# Altium integrated library PCB_Project.IntLib: 146 symbols (part 1 of 2)
Pins are listed as number, name and electrical type; pins without a type are passive.

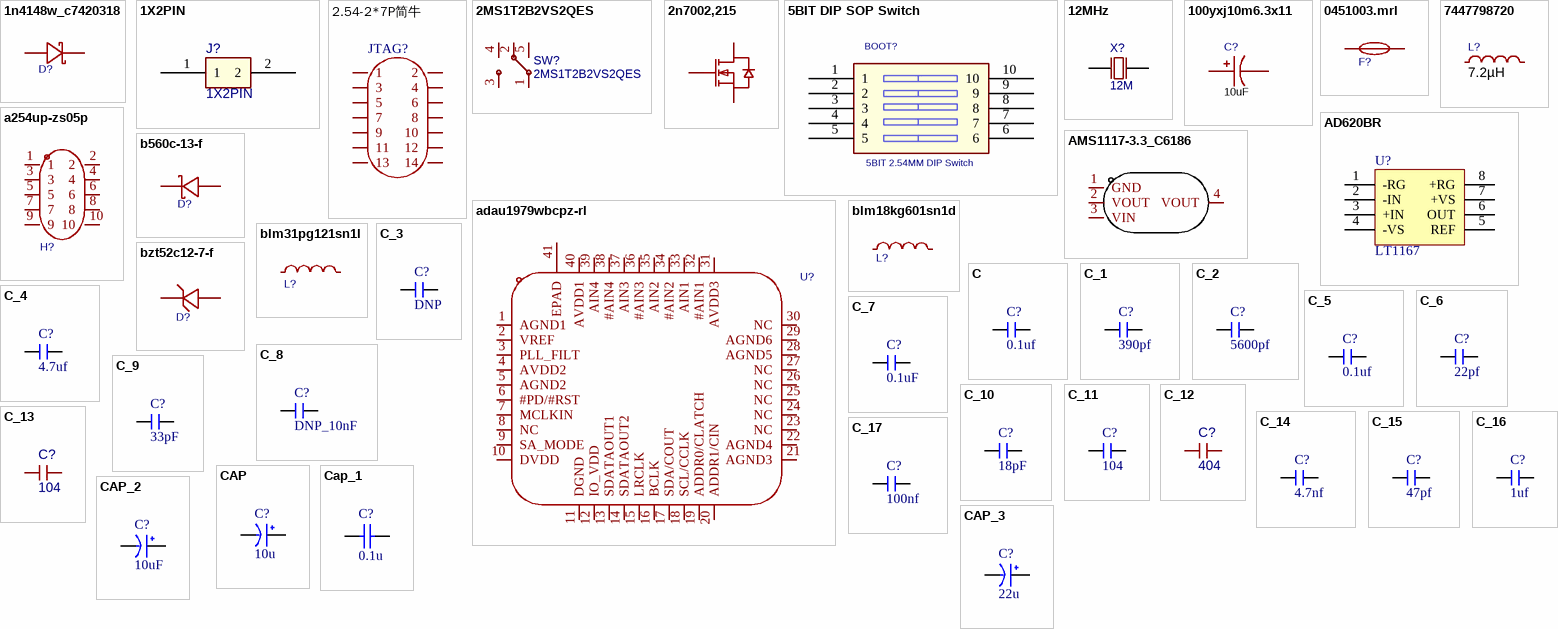
[diagram p0: symbols 1n4148w_c7420318 to CAP_3]

## 1n4148w_c7420318
designator D?  (value not drawn)
二极管配置:独立式;整流电流:150mA;直流反向耐压(Vr):100V;正向压降(Vf):1.25V@150mA;反向恢复时间(Trr):4ns;; Manufacturer: R+O(宏嘉诚); AddInBom: yes; ModelId: 5054d9b7be8b429dad093a54b517b4dd; ModelName: SOD-123_L2.7-W1.6-LS3.7-FD; ModelTransform: 145.669,61.024,0,0,0,0,0,0,0; Diode Configuration: 独立式; Pd - Power Dissipation: 400mW; Current - Rectified: 150mA; Voltage - DC Reverse(Vr): 100V; Non-Repetitive Peak Forward Surge Current: 2A; Reverse Leakage Current (Ir): 1uA@75V; Reverse Recovery Time (trr): 4ns; Operating Junction Temperature Range: -55℃~+150℃; Symbol: 1N4148W_C7420318; LCSC Part Name: 100V 150mA; SupplierPart: C7420318; ManufacturerPart: 1N4148W; Supplier Footprint: SOD-123; JLCPCB Part Class: Extended Part; Datasheet: https://item.szlcsc.com/datasheet/1N4148W/8397140.html; Supplier: LCSC; ConvertToPcb: yes; FootprintName: SOD-123_L2.7-W1.6-LS3.7-FD; Voltage - Forward(Vf@If): 1.25V@150mA
footprint SOD-123_L2.7-W1.6-LS3.7-FD
pins: 1 A, 2 K

## 1X2PIN
designator J?
footprint HDR2.54-Y-LI-2P (圆孔排母，2脚)
pins: 1, 2

## 2.54-2*7P简牛
designator JTAG?
Manufacturer: BOOMELE(博穆精密); Symbol: HDR-IDC-2.54-2X7P; Device: 2.54-2*7P简牛; Add into BOM: yes; Connector Type: 简牛座; Pitch: 2.54mm; Structure: 2x7P; Holder Type: 直插; Pin Number in each Row: 7; LCSC Part Name: 2.54mm 2x7P 排数:2 每排P数:7; Supplier Part: C11215; Manufacturer Part: 2.54-2*7P简牛; Supplier Footprint: 插件,P=2.54mm; JLCPCB Part Class: 扩展库; Datasheet: https://atta.szlcsc.com/upload/public/pdf/source/20131122/1457706661483.pdf; Supplier: LCSC; Convert to PCB: yes; Row Spacing: 2.54mm; Number of Rows: 2; Contact Material: 黄铜; Contact Plating: 金
footprint IDC-TH_14P-P2.54-V-R2-C7-S2.54
3D model IDC-TH_14P-P2.54-V-R2-C7-S2.54
pins: 1, 2, 3, 4, 5, 6, 7, 8, 9, 10, 11, 12, 13, 14

## 2MS1T2B2VS2QES
designator SW?
BOM_Manufacturer: Dailywell; Contributor: LCSC; BOM_Supplier: LCSC; BOM_Supplier Part: C545202; BOM_Manufacturer Part: 2MS1T2B2VS2QES; BOM_JLCPCB Part Class: Extended Part; spicePre: S; spiceSymbolName: 2MS1T2B2VS2QES
footprint SW-TH_2MS1T2B2VS2QES
pins: 1, 2, 3, 4, 5

## 2n7002,215
designator Q?  (value not drawn)
数量:1个N沟道;漏源电压(Vdss):60V;连续漏极电流(Id):300mA;导通电阻(RDS(on)):5Ω@10V;耗散功率(Pd):830mW;阈值电压(Vgs(th)):2.5V;; Manufacturer: Nexperia(安世); AddInBom: yes; ModelId: c62791f0466c4ae2a892c056b845b0ca; ModelName: SOT-23-3P_L2.9-W1.3-H1.0-LS2.4-P0.95; ModelTransform: 98.64468,114.173,0,180,0,0,0.001,-0.002,0; Number: 1个N沟道; Drain to Source Voltage: 60V; Current - Continuous Drain(Id): 300mA; RDS(on): 5Ω@10V; Pd - Power Dissipation: 830mW; Gate Threshold Voltage (Vgs(th)): 2.5V; Input Capacitance(Ciss): 50pF; Reverse Transfer Capacitance (Crss@Vds): 3.5pF; Type: N沟道; Output Capacitance(Coss): 6.8pF; Vgs: ±30V; Symbol: 2N7002,215; LCSC Part Name: 1个N沟道 耐压:60V 电流:300mA; SupplierPart: C65189; ManufacturerPart: 2N7002,215; Supplier Footprint: SOT-23; JLCPCB Part Class: Extended Part; Datasheet: https://item.szlcsc.com/datasheet/2N7002%252C215/66260.html; Supplier: LCSC; ConvertToPcb: yes; FootprintName: SOT-23_L2.9-W1.3-P1.90-LS2.4-BR; Gate Charge(Qg): -; Operating Temperature: -65℃~+150℃; Configuration: -
footprint SOT-23_L2.9-W1.3-P1.90-LS2.4-BR
pins: 1 G, 2 S, 3 D

## 5BIT DIP SOP Switch
designator BOOT?, comment 5BIT 2.54MM DIP Switch
Manufacturer: KE; Manufacturer PartNumber: DSWB05LHGET; Remark: 5位直插拨码开关 红色,2.54mm
footprint CON_5PIN_DIP_2D54
pins: 1, 2, 3, 4, 5, 6, 7, 8, 9, 10

## 12MHz
designator X?, comment 12M
BOM_Manufacturer: Yangxing Tech; BOM_Manufacturer Part: X49SM12MSB2SC; nameAlias: Frequency; Contributor: LCSC; BOM_Supplier: LCSC; BOM_Supplier Part: C110563; BOM_JLCPCB Part Class: Extended Part; spicePre: X; spiceSymbolName: X49SM12MSB2SC
footprint HC-49S_L11.4-W4.8 - duplicate
footprint HC-49S_L11.4-W4.8 - duplicate
pins: 1 OSC1, 2 OSC2

## 100yxj10m6.3x11
designator C?, comment 10uF
容值:10uF;精度:±20%;额定电压:100V;纹波电流:112.14mA@120Hz;等效串联电阻(ESR):570mΩ;; Manufacturer: Rubycon(红宝石); Symbol: 100YXJ10M6.3X11; AddInBom: yes; ModelId: 3cdd55eab6a840dba93006d5a727d063; ModelName: CAP-TH_BD6.3-P2.50-D0.6-FD; ModelTransform: 247.778,247.90446,0,0,0,0,0,0,-137.795; Tolerance: ±20%; Voltage Rating: 100V; Equivalent Series Resistance(ESR): 570mΩ; Pin Spacing: 2.5mm; Lifetime: 7000hrs@105℃; LCSC Part Name: 10uF ±20% 100V; SupplierPart: C1668981; ManufacturerPart: 100YXJ10M6.3X11; Supplier Footprint: 插件,D6.3xL11mm; JLCPCB Part Class: Extended Part; Supplier: LCSC; ConvertToPcb: yes; FootprintName: CAP-TH_BD6.3-P2.50-D0.6-FD; Value: 10uF; Ripple Current: 112.14mA@120Hz; Diameter: 6.3mm; Height - Seated (Max): 11mm; Operating Temperature: -40℃~+105℃
footprint CAP-TH_BD6.3-P2.50-D0.6-FD
pins: 1, 2

## 0451003.mrl
designator F?  (value not drawn)
类型:贴片式保险丝;额定电流:3A;额定电压:125V;分断能力:50A;; Manufacturer: Littelfuse(美国力特); AddInBom: yes; ModelId: ab98867368e34e88a7540bafa62641fb; ModelName: FUSE-SMD_L6.1-W2.7-H2.7; ModelTransform: 240.157,106.299,0,0,0,0,-0.0005,0.0005,0; Type: 贴片式保险丝; Current Rating: 3A; Voltage Rating (DC): 125V; Melting I2t: 0.459; Interrupt Rating: 50A; Symbol: 0451003.MRL; LCSC Part Name: 125V贴片式保险丝; SupplierPart: C13982; ManufacturerPart: 0451003.MRL; Supplier Footprint: 2410; JLCPCB Part Class: Extended Part; Datasheet: https://item.szlcsc.com/datasheet/0451003.MRL/14638.html; Supplier: LCSC; ConvertToPcb: yes; FootprintName: FUSE-SMD_L6.1-W2.7; Operating Temperature: -55℃~+125℃; Diameter (φD): -; Length: 6.1mm; Width: 2.5mm; Height: -; Pitch: -
footprint FUSE-SMD_L6.1-W2.7
pins: 1, 2

## 7447798720
designator L?, comment 7.2µH
电感值:7.2uH;精度:±30%;额定电流:7.9A;饱和电流(Isat):6A;类型:-;; Manufacturer: Wurth(伍尔特); Symbol: 7447798720; AddInBom: yes; ModelId: 669184afeb3a41a69bd447d1aa3c6b52; ModelName: IND-SMD_L10.2-W10.2_7447798720; ModelTransform: 401.574,402.3614,0,270,0,0,0,0,0; Value: 7.2uH; Tolerance: ±30%; Current Rating: 7.9A; Current - Saturation(Isat): 6A; DC Resistance(DCR): 12.8mΩ; LCSC Part Name: 7.2uH ±30% 6A; SupplierPart: C105681; ManufacturerPart: 7447798720; Supplier Footprint: SMD,10.2x10.2mm; JLCPCB Part Class: Extended Part; Datasheet: https://www.we-online.com/components/products/datasheet/7447798720.pdf; Supplier: LCSC; ConvertToPcb: yes; FootprintName: IND-SMD_L10.2-W10.2_7447798720; Type: -; Ratings: -
footprint IND-SMD_L10.2-W10.2_7447798720
pins: 1, 2

## a254up-zs05p
designator H?  (value not drawn)
插针结构:2x5P;间距:2.54mm;行距:2.54mm;圆针/方针:方针;安装方式:直插;排数:双排;总PIN位数:10P;额定电流:3A;配合针长度:6mm;塑高:2.5mm;触头材质:铜合金;触头镀层:金;工作温度:-40℃~+105℃;颜色:黑色;; Manufacturer: BXCONN(宝讯); AddInBom: yes; ModelId: c4cfba895466416fb2f10be924625d31; ModelName: HDR-TH_10P-P2.54-V-M-R2-C5-S2.54; ModelTransform: 500.00294,196.85,0,0,0,0,0,0,-118.11; Pin Structure: 2x5P; Pitch: 2.54mm; Circluar Pins/Square Pins: 方针; Current Rating: 3A; Symbol: A254UP-ZS05P; LCSC Part Name: 2x5P 间距:2.54mm 方针 直插; SupplierPart: C41413842; ManufacturerPart: A254UP-ZS05P; Supplier Footprint: 插件,P=2.54mm; JLCPCB Part Class: Extended Part; Datasheet: https://item.szlcsc.com/datasheet/A254UP-ZS05P/43230049.html; Supplier: LCSC; ConvertToPcb: yes; FootprintName: HDR-TH_10P-P2.54-V-M-R2-C5-S2.54; Row Spacing: 2.54mm; Mounting Type: 直插; Number of Rows: 双排; Number of Pins: 10P; Length of Mating Pin: 6mm; Insulation Height: 2.5mm; Contact Material: 铜合金; Contact Plating: 金; Operating Temperature: -40℃~+105℃; Color: 黑色
footprint HDR-TH_10P-P2.54-V-M-R2-C5-S2.54
pins: 1, 2, 3, 4, 5, 6, 7, 8, 9, 10

## AD620BR
designator U?, comment LT1167
CI-AD620BR
footprint SO-8 (封装库来自淘宝卖家 ID：黄晶宝石)
pins: 1 -RG, 2 -IN, 3 +IN, 4 -VS, 5 REF, 6 OUT, 7 +VS, 8 +RG

## adau1979wbcpz-rl
designator U?  (value not drawn)
分辨率:24;工作电压:3.3V~3.6V;接口类型:I2C；SPI;; Manufacturer: ADI(亚德诺); AddInBom: yes; ModelId: 7c9bc19ca4c64354924a13059f0c15c7; ModelName: QFN-40_L6.0-W6.0-P0.50-TL-EP4.1; ModelTransform: 237.007,237.007,0,0,0,0,0,0,0; Resolution: 24; Number of Channels: 4; Symbol: ADAU1979WBCPZ-RL; LCSC Part Name: 四通道模数转换器(ADC); SupplierPart: C207957; ManufacturerPart: ADAU1979WBCPZ-RL; Supplier Footprint: LFCSP-40(6x6); JLCPCB Part Class: Extended Part; Datasheet: https://item.szlcsc.com/datasheet/ADAU1979WBCPZ-RL/209011.html; Supplier: LCSC; ConvertToPcb: yes; FootprintName: QFN-40_L6.0-W6.0-P0.50-TL-EP4.1; Voltage - Supply: 3.3V~3.6V; Interface Type: I2C；SPI; Operating Temperature: -40℃~+105℃
footprint QFN-40_L6.0-W6.0-P0.50-TL-EP4.1
pins: 1 AGND1, 2 VREF, 3 PLL_FILT, 4 AVDD2, 5 AGND2, 6 #PD/#RST, 7 MCLKIN, 8 NC, 9 SA_MODE, 10 DVDD, 11 DGND, 12 IO_VDD, 13 SDATAOUT1, 14 SDATAOUT2, 15 LRCLK, 16 BCLK, 17 SDA/COUT, 18 SCL/CCLK, 19 ADDR0/CLATCH, 20 ADDR1/CIN, 21 AGND3, 22 AGND4, 23 NC, 24 NC, 25 NC, 26 NC, 27 NC, 28 AGND5, 29 AGND6, 30 NC, 31 AVDD3, 32 #AIN1, 33 AIN1, 34 #AIN2, 35 AIN2, 36 #AIN3, 37 AIN3, 38 #AIN4, 39 AIN4, 40 AVDD1, 41 EPAD

## AMS1117-3.3_C6186
designator U?  (value not drawn)
Manufacturer: AMS; Add into BOM: yes; Output Type: 固定; Output Voltage: 3.3V; MAX Output Current: 1A; Power Supply Rejection Ratio (PSRR): 72dB@(120Hz); Dropout Voltage: 1.3V@(800mA); Output Polarity: 正极; Number of Outputs: 1; Symbol: AMS1117-3.3; Device: AMS1117-3.3_C6186; LCSC Part Name: 输出3.3V 1A; Supplier Part: C6186; Manufacturer Part: AMS1117-3.3; Supplier Footprint: SOT-223-3; JLCPCB Part Class: Basic Part; Datasheet: https://atta.szlcsc.com/upload/public/pdf/source/20180727/C6186_7A095716F0823C02F1997A905E26C086.pdf; Supplier: LCSC; Convert to PCB: yes; Maximum Input Voltage: -; standby current: -; Noise: -; Feature: -; Operating Temperature: -
footprint SOT-223-3_L6.5-W3.4-P2.30-LS7.0-BR
pins: 1 GND, 2 VOUT, 3 VIN, 4 VOUT

## b560c-13-f
designator D?  (value not drawn)
二极管配置:1个独立式;正向压降(Vf):700mV@5A;直流反向耐压(Vr):60V;整流电流:5A;; Manufacturer: DIODES(美台); AddInBom: yes; ModelId: 01527a4a3c424c5dbce25e8907f4d20c; ModelName: SMC_L7.1-W6.2-LS8.1-RD; ModelTransform: 314.96,236.22,0,0,0,0,0,0,0; Diode Configuration: 1个独立式; Voltage - DC Reverse(Vr): 60V; Current - Rectified: 5A; Reverse Leakage Current (Ir): 500uA@60V; Operating Junction Temperature Range: -55℃~+150℃; Non-Repetitive Peak Forward Surge Current: 100A; Symbol: B560C-13-F; LCSC Part Name: 电压:60V 电流:5A; SupplierPart: C85100; ManufacturerPart: B560C-13-F; Supplier Footprint: SMC(DO-214AB); JLCPCB Part Class: Extended Part; Datasheet: https://item.szlcsc.com/datasheet/B560C-13-F/86272.html; Supplier: LCSC; ConvertToPcb: yes; FootprintName: SMC_L7.1-W6.2-LS8.1-RD; Voltage - Forward(Vf@If): 700mV@5A
footprint SMC_L7.1-W6.2-LS8.1-RD
pins: 1 K, 2 A

## blm18kg601sn1d
designator L?  (value not drawn)
阻抗@频率:600Ω@100MHz;误差:±25%;直流电阻(DCR):150mΩ;; Manufacturer: muRata(村田); AddInBom: yes; ModelId: 2bc5ec593d464d6ba9807aec0b5673c2; ModelName: L0603_L1.6-W0.8-H0.5_BEAD; ModelTransform: 62.992,31.496,0,180,0,0,0.094,0.629,0; Tolerance: ±25%; DC Resistance(DCR): 150mΩ; Current Rating: 1.3A; Number of Circuits: 1; Symbol: BLM18KG601SN1D; LCSC Part Name: 单路 0603磁珠 阻抗600Ω@100MHz; SupplierPart: C85833; ManufacturerPart: BLM18KG601SN1D; Supplier Footprint: 0603; JLCPCB Part Class: Extended Part; Datasheet: https://item.szlcsc.com/datasheet/BLM18KG601SN1D/87009.html; Supplier: LCSC; ConvertToPcb: yes; FootprintName: L0603; Impedance @ Frequency: 600Ω@100MHz; Operating Temperature: -55℃~+125℃
footprint L0603
pins: 1, 2

## blm31pg121sn1l
designator L?  (value not drawn)
阻抗@频率:120Ω@100MHz;误差:±25%;直流电阻(DCR):20mΩ;; Manufacturer: muRata(村田); AddInBom: yes; ModelId: 85bdab7b3d4c4074b81d208eb5e865b3; ModelName: L1206_L3.2-W1.6-H1.1; ModelTransform: 125.984,62.835,0,0,0,0,0,0,0; Tolerance: ±25%; DC Resistance(DCR): 20mΩ; Current Rating: 3.5A; Number of Circuits: 1; Symbol: BLM31PG121SN1L; LCSC Part Name: 单路 1206磁珠 阻抗120Ω@100MHz; SupplierPart: C85841; ManufacturerPart: BLM31PG121SN1L; Supplier Footprint: 1206; JLCPCB Part Class: Extended Part; Datasheet: https://item.szlcsc.com/datasheet/BLM31PG121SN1L/87017.html; Supplier: LCSC; ConvertToPcb: yes; FootprintName: L1206; Impedance @ Frequency: 120Ω@100MHz; Operating Temperature: -55℃~+125℃
footprint L1206
pins: 1, 2

## bzt52c12-7-f
designator D?  (value not drawn)
二极管配置:1个独立式;稳压值(标称值):12V;稳压值(范围值):11.4V~12.7V;耗散功率(Pd):370mW;; Manufacturer: DIODES(美台); AddInBom: yes; ModelId: ad7e39f9e5534b3c96ffdc5532ebb493; ModelName: SOD-123_L2.7-W1.6-H1.4-LS3.7; ModelTransform: 146.026,62.992,0,180,0,0,0.0005,0,0; Diode Configuration: 1个独立式; Zener Voltage(Nom): 12V; Reverse Leakage Current (Ir): 100nA@1V; Pd - Power Dissipation: 370mW; Impedance(Zzt): 25Ω; Impedance(Zzk): 150Ω; Operating Junction Temperature Range: -65℃~+150℃; Symbol: BZT52C12-7-F; LCSC Part Name: 独立式 耐压:12V 电流:0.1uA@1.0V; SupplierPart: C124196; ManufacturerPart: BZT52C12-7-F; Supplier Footprint: SOD-123; JLCPCB Part Class: Extended Part; Datasheet: https://item.szlcsc.com/datasheet/BZT52C12-7-F/125471.html; Supplier: LCSC; ConvertToPcb: yes; FootprintName: SOD-123_L2.7-W1.6-LS3.7-RD; Zener Voltage(Range): 11.4V~12.7V; Tolerance: -
footprint SOD-123_L2.7-W1.6-LS3.7-RD
pins: 1 C, 2 A

## C
designator C?, comment 0.1uf
无极性贴片电容; 版权归属: 源创客; BOM名称: 无极性贴片电容; 学习资源: www.ooocke.com
footprint 0603C
pins: 1, 2

## C_1
designator C?, comment 390pf
无极性贴片电容; 版权归属: 源创客; BOM名称: 无极性贴片电容; 学习资源: www.ooocke.com
footprint 0603C
pins: 1, 2

## C_2
designator C?, comment 5600pf
无极性贴片电容; 版权归属: 源创客; BOM名称: 无极性贴片电容; 学习资源: www.ooocke.com
footprint 0603C
pins: 1, 2

## C_3
designator C?, comment DNP
无极性贴片电容; 版权归属: 源创客; BOM名称: 无极性贴片电容; 学习资源: www.ooocke.com
footprint 0603C
pins: 1, 2

## C_4
designator C?, comment 4.7uf
无极性贴片电容; 版权归属: 源创客; BOM名称: 无极性贴片电容; 学习资源: www.ooocke.com
footprint 0603C
pins: 1, 2

## C_5
designator C?, comment 0.1uf
无极性贴片电容; 版权归属: 源创客; BOM名称: 无极性贴片电容; 学习资源: www.ooocke.com
footprint 0603C
pins: 1, 2

## C_6
designator C?, comment 22pf
无极性贴片电容; 版权归属: 源创客; BOM名称: 无极性贴片电容; 学习资源: www.ooocke.com
footprint 0603C
pins: 1, 2

## C_7
designator C?, comment 0.1uF
贴片电容; BOM名称: 无极性贴片电容; 淘宝ID: 封装库来自淘宝 ID：黄晶宝石; 联系售后，技术支持: https://shop463601444.taobao.com; 唯一出售店铺网址: https://shop463601444.taobao.com
footprint 0603C
pins: 1, 2

## C_8
designator C?, comment DNP_10nF
无极性贴片电容; 版权归属: 源创客; BOM名称: 无极性贴片电容; 学习资源: www.ooocke.com
footprint 0603C
pins: 1, 2

## C_9
designator C?, comment 33pF
贴片电容; BOM名称: 无极性贴片电容; 淘宝ID: 封装库来自淘宝 ID：黄晶宝石; 联系售后，技术支持: https://shop463601444.taobao.com; 唯一出售店铺网址: https://shop463601444.taobao.com
footprint 0603C
pins: 1, 2

## C_10
designator C?, comment 18pF
贴片电容; BOM名称: 无极性贴片电容; 淘宝ID: 封装库来自淘宝 ID：黄晶宝石; 联系售后，技术支持: https://shop463601444.taobao.com; 唯一出售店铺网址: https://shop463601444.taobao.com
footprint 0603C
pins: 1, 2

## C_11
designator C?, comment 104
贴片电容; BOM名称: 无极性贴片电容; 淘宝ID: 封装库来自淘宝 ID：黄晶宝石; 联系售后，技术支持: https://shop463601444.taobao.com; 唯一出售店铺网址: https://shop463601444.taobao.com
footprint 0603C
pins: 1, 2

## C_12
designator C?, comment 404
贴片电容; Device: C; BOM名称: 无极性贴片电容; 淘宝ID: 封装库来自淘宝 ID：黄晶宝石; Origin Footprint: C 0201_L; OriginFootprint 2: C 0402_L; OriginFootprint 3: C 0805_L; OriginFootprint 4: C 1206_L; OriginFootprint 5: C 1210_L; OriginFootprint 6: C 1808_L; OriginFootprint 7: C 1812_L; OriginFootprint 8: C 1825_L; OriginFootprint 9: C 2225_L; OriginFootprint 10: C 0201_M; OriginFootprint 11: C 0402_M; OriginFootprint 12: C 0603_M; OriginFootprint 13: C 0805_M; OriginFootprint 14: C 1206_M; OriginFootprint 15: C 1210_M; OriginFootprint 16: C 1808_M; OriginFootprint 17: C 1812_M; OriginFootprint 18: C 1825_M; OriginFootprint 19: C 2225_M; UniqueId: 043006a40a259ae3; AddInBom: yes; OriginModelName: C 0603; 联系售后，技术支持: https://shop463601444.taobao.com; 唯一出售店铺网址: https://shop463601444.taobao.com; DesignItemID: C; LibraryName: 0.1 - 电阻-电容-电感; SymbolName: C; FootprintName: C 0603_L
footprint C 0603_L
pins: 1, 2

## C_13
designator C?, comment 104
贴片电容; Device: C; BOM名称: 无极性贴片电容; 淘宝ID: 封装库来自淘宝 ID：黄晶宝石; Origin Footprint: C 0201_L; OriginFootprint 2: C 0402_L; OriginFootprint 3: C 0805_L; OriginFootprint 4: C 1206_L; OriginFootprint 5: C 1210_L; OriginFootprint 6: C 1808_L; OriginFootprint 7: C 1812_L; OriginFootprint 8: C 1825_L; OriginFootprint 9: C 2225_L; OriginFootprint 10: C 0201_M; OriginFootprint 11: C 0402_M; OriginFootprint 12: C 0603_M; OriginFootprint 13: C 0805_M; OriginFootprint 14: C 1206_M; OriginFootprint 15: C 1210_M; OriginFootprint 16: C 1808_M; OriginFootprint 17: C 1812_M; OriginFootprint 18: C 1825_M; OriginFootprint 19: C 2225_M; UniqueId: 909660952e1a96fd; AddInBom: yes; OriginModelName: C 0603; 联系售后，技术支持: https://shop463601444.taobao.com; 唯一出售店铺网址: https://shop463601444.taobao.com; DesignItemID: C; LibraryName: 0.1 - 电阻-电容-电感; SymbolName: C; FootprintName: C 0603_L
footprint C 0603_L
pins: 1, 2

## C_14
designator C?, comment 4.7nf
无极性贴片电容; 版权归属: 源创客; BOM名称: 无极性贴片电容; 学习资源: www.ooocke.com
footprint 0603C
pins: 1, 2

## C_15
designator C?, comment 47pf
无极性贴片电容; 版权归属: 源创客; BOM名称: 无极性贴片电容; 学习资源: www.ooocke.com
footprint 0603C
pins: 1, 2

## C_16
designator C?, comment 1uf
无极性贴片电容; 版权归属: 源创客; BOM名称: 无极性贴片电容; 学习资源: www.ooocke.com
footprint 0603C
pins: 1, 2

## C_17
designator C?, comment 100nf
无极性贴片电容; 版权归属: 源创客; BOM名称: 无极性贴片电容; 学习资源: www.ooocke.com
footprint 0603C
pins: 1, 2

## CAP
designator C?, comment 10u
footprint 5x11mm
pins: 1 VCC, 2 GND

## Cap_1
designator C?, comment 0.1u
Capacitor; Value: 104; Published: 8-Jun-2000; LatestRevisionDate: 17-Jul-2002; LatestRevisionNote: Re-released for DXP Platform.; Publisher: Altium Limited
simulation model CAP (Capacitor)
signal-integrity model Cap
footprint 0603C
pins: 1, 2

## CAP_2
designator C?, comment 10uF
footprint 5x11mm
pins: 1 VCC, 2 GND

## CAP_3
designator C?, comment 22u
footprint 5x11mm
pins: 1 VCC, 2 GND

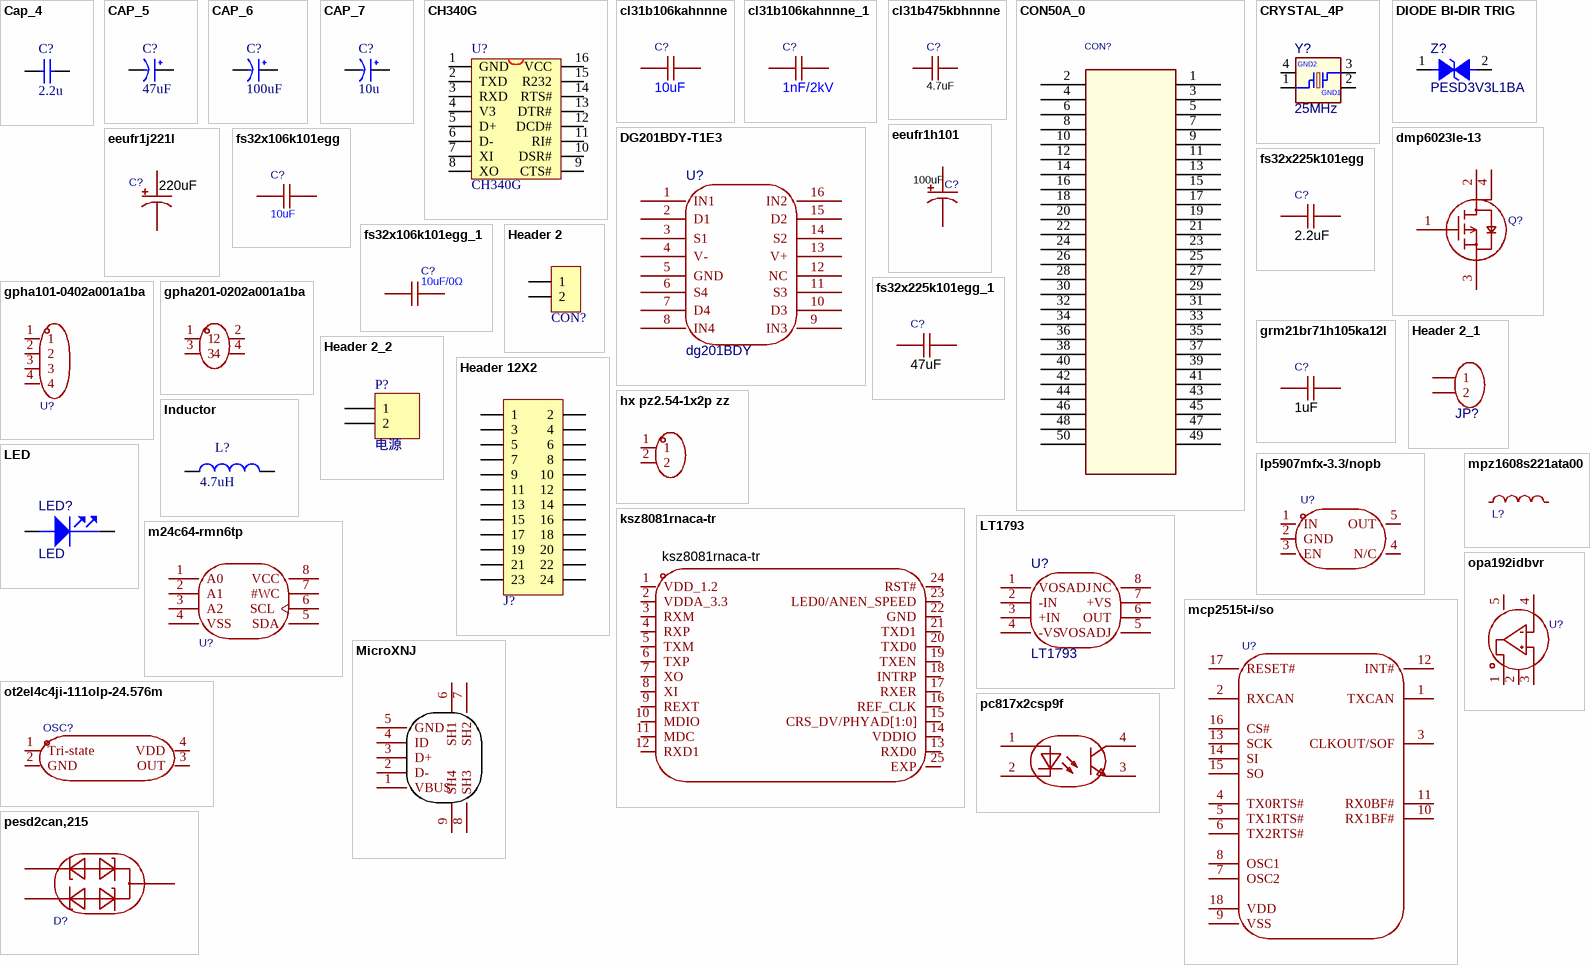
[diagram p1: symbols Cap_4 to pesd2can,215]

## Cap_4
designator C?, comment 2.2u
Capacitor; Value: 104; Published: 8-Jun-2000; LatestRevisionDate: 17-Jul-2002; LatestRevisionNote: Re-released for DXP Platform.; Publisher: Altium Limited
simulation model CAP (Capacitor)
signal-integrity model Cap
footprint 0603C
pins: 1, 2

## CAP_5
designator C?, comment 47uF
47µF/25V
footprint CAP-TH_BD8.0-P3.50-D0.6-FD
pins: 1 VCC, 2 GND

## CAP_6
designator C?, comment 100uF
100µF/63V
footprint CAP-TH_BD8.0-P3.50-D0.6-FD
pins: 1 VCC, 2 GND

## CAP_7
designator C?, comment 10u
10µF/25V
footprint 5x11mm
pins: 1 VCC, 2 GND

## CH340G
designator U?
USB2UART
footprint SOP16M (Small Outline; 16 Leads; Body Width 3.9 mm; Pitch 1.27 mm)
pins: 1 GND, 2 TXD, 3 RXD, 4 V3, 5 D+, 6 D-, 7 XI, 8 XO, 9 CTS#, 10 DSR#, 11 RI#, 12 DCD#, 13 DTR#, 14 RTS#, 15 R232, 16 VCC

## cl31b106kahnnne
designator C?, comment 10uF
容值:10uF;精度:±10%;额定电压:25V;温度系数:X7R;; Manufacturer: SAMSUNG(三星); Symbol: CL31B106KAHNNNE; AddInBom: yes; ModelId: e4be705b945545a48e666415e3682bd8; ModelName: C1206_L3.2-W1.6-H1.3; ModelTransform: 125.984,62.992,0,0,0,0,0,0,0; Tolerance: ±10%; Voltage Rating: 25V; Temperature Coefficient: X7R; LCSC Part Name: 10uF ±10% 25V; SupplierPart: C14860; ManufacturerPart: CL31B106KAHNNNE; Supplier Footprint: 1206; JLCPCB Part Class: Extended Part; Datasheet: https://item.szlcsc.com/datasheet/CL31B106KAHNNNE/15532.html; Supplier: LCSC; ConvertToPcb: yes; FootprintName: C1206; Value: 10uF
footprint C1206
pins: 1, 2

## cl31b106kahnnne_1
designator C?, comment 1nF/2kV
容值:10uF;精度:±10%;额定电压:25V;温度系数:X7R;; Manufacturer: SAMSUNG(三星); Symbol: CL31B106KAHNNNE; AddInBom: yes; ModelId: e4be705b945545a48e666415e3682bd8; ModelName: C1206_L3.2-W1.6-H1.3; ModelTransform: 125.984,62.992,0,0,0,0,0,0,0; Value: 10uF; Tolerance: ±10%; Voltage Rating: 25V; Temperature Coefficient: X7R; LCSC Part Name: 10uF ±10% 25V; SupplierPart: C14860; ManufacturerPart: CL31B106KAHNNNE; Supplier Footprint: 1206; JLCPCB Part Class: Extended Part; Datasheet: https://item.szlcsc.com/datasheet/CL31B106KAHNNNE/15532.html; Supplier: LCSC; ConvertToPcb: yes; FootprintName: C1206
footprint C1206
pins: 1, 2

## cl31b475kbhnnne
designator C?, comment 4.7uF
容值:4.7uF;精度:±10%;额定电压:50V;温度系数:X7R;; Manufacturer: SAMSUNG(三星); Symbol: CL31B475KBHNNNE; AddInBom: yes; ModelId: e4be705b945545a48e666415e3682bd8; ModelName: C1206_L3.2-W1.6-H1.3; ModelTransform: 125.984,62.992,0,0,0,0,0,0,0; Tolerance: ±10%; Voltage Rating: 50V; Temperature Coefficient: X7R; LCSC Part Name: 4.7uF ±10% 50V; SupplierPart: C51205; ManufacturerPart: CL31B475KBHNNNE; Supplier Footprint: 1206; JLCPCB Part Class: Extended Part; Datasheet: https://item.szlcsc.com/datasheet/CL31B475KBHNNNE/52218.html; Supplier: LCSC; ConvertToPcb: yes; FootprintName: C1206; Value: 4.7uF
footprint C1206
pins: 1, 2

## CON50A_0
designator CON?
Manufacturer: 连科; Manufacturer PartNumber: NLWBP05-50C-1.3H; Remark: 0.5mm 50P B2B 3.5mm合高 公头
footprint NLWBS05-50C-2.2H
pins: 1, 2, 3, 4, 5, 6, 7, 8, 9, 10, 11, 12, 13, 14, 15, 16, 17, 18, 19, 20, 21, 22, 23, 24, 25, 26, 27, 28, 29, 30, 31, 32, 33, 34, 35, 36, 37, 38, 39, 40, 41, 42, 43, 44, 45, 46, 47, 48, 49, 50

## CRYSTAL_4P
designator Y?, comment 25MHz
CLASS: IC
footprint SMD3225-4P
pins: 1, 2 GND1 (power), 3, 4 GND2 (power)

## DG201BDY-T1E3
designator U?, comment dg201BDY
Device: DG201BDY-T1E3; UniqueId: 4bb3335060f18692; AddInBom: yes; DesignItemID: DG201BDY-T1E3; LibraryName: 4.1 - 未分类器件; SymbolName: DG201BDY-T1E3; FootprintName: dg201BDY
footprint dg201BDY
pins: 1 IN1, 2 D1, 3 S1, 4 V-, 5 GND, 6 S4, 7 D4, 8 IN4, 9 IN3, 10 D3, 11 S3, 12 NC, 13 V+, 14 S2, 15 D2, 16 IN2

## DIODE BI-DIR TRIG
designator Z?, comment PESD3V3L1BA
footprint SOD-323 (1.8x1.3X0.9mm（长宽高，不包括引脚）)
pins: 1, 2

## dmp6023le-13
designator Q?  (value not drawn)
数量:1个P沟道;漏源电压(Vdss):60V;连续漏极电流(Id):7A;导通电阻(RDS(on)):35mΩ@4.5V;耗散功率(Pd):2W;阈值电压(Vgs(th)):3V;; Manufacturer: DIODES(美台); AddInBom: yes; ModelId: 925194bf9823436183a3e0b978a8d076; ModelName: SOT-223-4P_L6.5-W3.5-H1.6-LS7.0-P2.30; ModelTransform: 279.89794,255.905,0,180,0,0,-0.0005,-0.0005,0; Number: 1个P沟道; Drain to Source Voltage: 60V; Current - Continuous Drain(Id): 7A; Pd - Power Dissipation: 2W; Gate Threshold Voltage (Vgs(th)): 3V; Gate Charge(Qg): 53.1nC@10V; Input Capacitance(Ciss): 2.569nF; Reverse Transfer Capacitance (Crss@Vds): 143pF; Type: P沟道; Output Capacitance(Coss): 179pF; Symbol: DMP6023LE-13; LCSC Part Name: 1个P沟道 耐压:60V 电流:7A; SupplierPart: C154901; ManufacturerPart: DMP6023LE-13; Supplier Footprint: SOT-223; JLCPCB Part Class: Extended Part; Datasheet: https://item.szlcsc.com/datasheet/DMP6023LE-13/166243.html; Supplier: LCSC; ConvertToPcb: yes; FootprintName: SOT-223-4_L6.5-W3.5-P2.30-LS7.0-BR; RDS(on): 35mΩ@4.5V; Operating Temperature: -55℃~+150℃
footprint SOT-223-4_L6.5-W3.5-P2.30-LS7.0-BR
pins: 1 G, 2 D, 3 S, 4 D

## eeufr1h101
designator C?, comment 100uF
容值:100uF;精度:±20%;额定电压:50V;纹波电流:870mA@100kHz;等效串联电阻(ESR):61mΩ@100kHz;; Manufacturer: PANASONIC(松下); Symbol: EEUFR1H101; AddInBom: yes; ModelId: 5fc21599cab34df2ad7753b19b2f5286; ModelName: CAP-TH_BD8.0-P3.50-D0.6-FD_1; ModelTransform: 315.365,314.914,0,0,0,0,0,0,-196.85; Tolerance: ±20%; Voltage Rating: 50V; Pin Spacing: 3.5mm; Lifetime: 6000hrs@105℃; Polarity type: 有极性; LCSC Part Name: 100uF ±20% 50V; SupplierPart: C178702; ManufacturerPart: EEUFR1H101; Supplier Footprint: 插件,D8xL11.5mm; JLCPCB Part Class: Extended Part; Datasheet: https://item.szlcsc.com/datasheet/EEUFR1H101/190095.html; Supplier: LCSC; ConvertToPcb: yes; FootprintName: CAP-TH_BD8.0-P3.50-D0.6-FD_1; Value: 100uF; Ripple Current: 870mA@100kHz; Equivalent Series Resistance(ESR): 61mΩ@100kHz; Diameter: 8mm; Height - Seated (Max): 11.5mm; Operating Temperature: -40℃~+105℃
footprint CAP-TH_BD8.0-P3.50-D0.6-FD_1
pins: 1, 2

## eeufr1j221l
designator C?, comment 220uF
容值:220uF;精度:±20%;额定电压:63V;纹波电流:1.5A@100kHz;等效串联电阻(ESR):33mΩ@100kHz;; Manufacturer: PANASONIC(松下); Symbol: EEUFR1J221L; AddInBom: yes; ModelId: 6ce78ce5315348e095d700085da75e48; ModelName: CAP-TH_D10.0-H16.0-P5.00; ModelTransform: 394.094,393.72252,0,0,0,0,0,0,-137.795; Tolerance: ±20%; Voltage Rating: 63V; Pin Spacing: 5mm; Lifetime: 10000hrs@105℃; LCSC Part Name: 220uF ±20% 63V; SupplierPart: C178712; ManufacturerPart: EEUFR1J221L; Supplier Footprint: 插件,D10xL25mm; JLCPCB Part Class: Extended Part; Datasheet: https://item.szlcsc.com/datasheet/EEUFR1J221L/190105.html; Supplier: LCSC; ConvertToPcb: yes; FootprintName: CAP-TH_BD10.0-P5.00-D1.0-FD; Value: 220uF; Ripple Current: 1.5A@100kHz; Equivalent Series Resistance(ESR): 33mΩ@100kHz; Diameter: 10mm; Height - Seated (Max): 25mm; Operating Temperature: -40℃~+105℃
footprint CAP-TH_BD10.0-P5.00-D1.0-FD
pins: 1, 2

## fs32x106k101egg
designator C?, comment 10uF
容值:10uF;精度:±10%;额定电压:100V;温度系数:X7R;; Manufacturer: PSA(信昌电陶); Symbol: FS32X106K101EGG; AddInBom: yes; ModelId: 833068e7fe044595a6eec77c56179455; ModelName: C1210_L3.2-W2.5-H2.5; ModelTransform: 125.984,98.425,0,0,0,0,0,0,0; Tolerance: ±10%; Voltage Rating: 100V; Temperature Coefficient: X7R; LCSC Part Name: 10uF ±10% 100V; SupplierPart: C5156756; ManufacturerPart: FS32X106K101EGG; Supplier Footprint: 1210; JLCPCB Part Class: Extended Part; Datasheet: https://item.szlcsc.com/datasheet/FS32X106K101EGG/5791227.html; Supplier: LCSC; ConvertToPcb: yes; FootprintName: C1210; Value: 10uF
footprint C1210
pins: 1, 2

## fs32x106k101egg_1
designator C?, comment 10uF/0Ω
容值:10uF;精度:±10%;额定电压:100V;温度系数:X7R;; Manufacturer: PSA(信昌电陶); Symbol: FS32X106K101EGG; AddInBom: yes; ModelId: 833068e7fe044595a6eec77c56179455; ModelName: C1210_L3.2-W2.5-H2.5; ModelTransform: 125.984,98.425,0,0,0,0,0,0,0; Value: 10uF; Tolerance: ±10%; Voltage Rating: 100V; Temperature Coefficient: X7R; LCSC Part Name: 10uF ±10% 100V; SupplierPart: C5156756; ManufacturerPart: FS32X106K101EGG; Supplier Footprint: 1210; JLCPCB Part Class: Extended Part; Datasheet: https://item.szlcsc.com/datasheet/FS32X106K101EGG/5791227.html; Supplier: LCSC; ConvertToPcb: yes; FootprintName: C1210
footprint C1210
pins: 1, 2

## fs32x225k101egg
designator C?, comment 2.2uF
容值:2.2uF;精度:±10%;额定电压:100V;温度系数:X7R;; Manufacturer: PSA(信昌电陶); Symbol: FS32X225K101EGG; AddInBom: yes; ModelId: 833068e7fe044595a6eec77c56179455; ModelName: C1210_L3.2-W2.5-H2.5; ModelTransform: 125.984,98.425,0,0,0,0,0,0,0; Tolerance: ±10%; Voltage Rating: 100V; Temperature Coefficient: X7R; LCSC Part Name: 2.2uF ±10% 100V; SupplierPart: C153036; ManufacturerPart: FS32X225K101EGG; Supplier Footprint: 1210; JLCPCB Part Class: Extended Part; Datasheet: https://item.szlcsc.com/datasheet/FS32X225K101EGG/164378.html; Supplier: LCSC; ConvertToPcb: yes; FootprintName: C1210; Value: 2.2uF
footprint C1210
pins: 1, 2

## fs32x225k101egg_1
designator C?, comment 47uF
容值:2.2uF;精度:±10%;额定电压:100V;温度系数:X7R;; Manufacturer: PSA(信昌电陶); Symbol: FS32X225K101EGG; AddInBom: yes; ModelId: 833068e7fe044595a6eec77c56179455; ModelName: C1210_L3.2-W2.5-H2.5; ModelTransform: 125.984,98.425,0,0,0,0,0,0,0; Value: 2.2uF; Tolerance: ±10%; Voltage Rating: 100V; Temperature Coefficient: X7R; LCSC Part Name: 2.2uF ±10% 100V; SupplierPart: C153036; ManufacturerPart: FS32X225K101EGG; Supplier Footprint: 1210; JLCPCB Part Class: Extended Part; Datasheet: https://item.szlcsc.com/datasheet/FS32X225K101EGG/164378.html; Supplier: LCSC; ConvertToPcb: yes; FootprintName: C1210
footprint C1210
pins: 1, 2

## gpha101-0402a001a1ba
designator U?  (value not drawn)
插针结构:1x4P;间距:2.54mm;行距:2.54mm;圆针/方针:方针;安装方式:直插;排数:单排;总PIN位数:4P;额定电流:3A;塑高:2.54mm;触头材质:黄铜;触头镀层:金;工作温度:-40℃~+105℃;颜色:黑色;; Manufacturer: GREENCONN(格康); AddInBom: yes; ModelId: 112f4d05e8d64e99ab9a333894bea4f9; ModelName: HDR-TH_4P-P2.54-M-LI-1X4P; ModelTransform: 399.999,104.7242,0,0,0,0,0,0,-118.11; Pin Structure: 1x4P; Pitch: 2.54mm; Circluar Pins/Square Pins: 方针; Current Rating: 3A; Symbol: GPHA101-0402A001A1BA; LCSC Part Name: 1x4P 间距:2.54mm 方针 直插; SupplierPart: C7434478; ManufacturerPart: GPHA101-0402A001A1BA; Supplier Footprint: 插件,P=2.54mm; JLCPCB Part Class: Extended Part; Datasheet: https://item.szlcsc.com/datasheet/GPHA101-0402A001A1BA/8446402.html; Supplier: LCSC; ConvertToPcb: yes; FootprintName: HDR-TH_4P-P2.54-V-M; Row Spacing: 2.54mm; Mounting Type: 直插; Number of Rows: 单排; Number of Pins: 4P; Insulation Height: 2.54mm; Contact Material: 黄铜; Contact Plating: 金; Operating Temperature: -40℃~+105℃; Color: 黑色
footprint HDR-TH_4P-P2.54-V-M
pins: 1, 2, 3, 4

## gpha201-0202a001a1ba
designator U?  (value not drawn)
插针结构:2x2P;间距:2.54mm;行距:2.54mm;圆针/方针:方针;安装方式:直插;排数:双排;总PIN位数:4P;额定电流:3A;塑高:2.54mm;触头材质:黄铜;触头镀层:金;工作温度:-40℃~+105℃;颜色:黑色;; Manufacturer: GREENCONN(格康); AddInBom: yes; ModelId: 396726ecc332483f84428c142640bc15; ModelName: HDR-TH_4P-P2.54-M-LI-2X2P; ModelTransform: 200.03897,196.85,0,0,0,0,0,0,-118.11; Pin Structure: 2x2P; Pitch: 2.54mm; Circluar Pins/Square Pins: 方针; Current Rating: 3A; Symbol: GPHA201-0202A001A1BA; LCSC Part Name: 2x2P 间距:2.54mm 方针 直插; SupplierPart: C7434503; ManufacturerPart: GPHA201-0202A001A1BA; Supplier Footprint: 插件,P=2.54mm; JLCPCB Part Class: Extended Part; Datasheet: https://item.szlcsc.com/datasheet/GPHA201-0202A001A1BA/8446427.html; Supplier: LCSC; ConvertToPcb: yes; FootprintName: HDR-TH_4P-P2.54-V-M-R2-C2-S2.54; Row Spacing: 2.54mm; Mounting Type: 直插; Number of Rows: 双排; Number of Pins: 4P; Insulation Height: 2.54mm; Contact Material: 黄铜; Contact Plating: 金; Operating Temperature: -40℃~+105℃; Color: 黑色
footprint HDR-TH_4P-P2.54-V-M-R2-C2-S2.54
pins: 1, 2, 3, 4

## grm21br71h105ka12l
designator C?, comment 1uF
容值:1uF;精度:±10%;额定电压:50V;温度系数:X7R;; Manufacturer: muRata(村田); Symbol: GRM21BR71H105KA12L; AddInBom: yes; ModelId: 1ba041120af144c991958decab20d241; ModelName: C0805_L2.0-W1.3-H1.3; ModelTransform: 78.74,51.181,0,0,0,0,0,0.0005,0; Tolerance: ±10%; Voltage Rating: 50V; Temperature Coefficient: X7R; LCSC Part Name: 1uF ±10% 50V; SupplierPart: C77083; ManufacturerPart: GRM21BR71H105KA12L; Supplier Footprint: 0805; JLCPCB Part Class: Extended Part; Datasheet: https://item.szlcsc.com/datasheet/GRM21BR71H105KA12L/78210.html; Supplier: LCSC; ConvertToPcb: yes; FootprintName: C0805; Value: 1uF
footprint C0805
pins: 1, 2

## Header 2
designator CON?, comment HDR-1X2  (value not drawn)
2P接插件; 版权归属: 封装库来自淘宝卖家 ID：黄晶宝石; BOM名称: 2P接插件; 学习资源: https://shop463601444.taobao.com
footprint KF128-5.08-2P (螺钉式接线端子，脚距5.08mm)
pins: 1, 2

## Header 2_1
designator JP?, comment HDR-1X2  (value not drawn)
2P接插件; Device: Header 2; 版权归属: 封装库来自淘宝 ID：黄晶宝石; Origin Footprint: XH2.54-WI-2P; OriginFootprint 2: XH2.54-LI-2P; OriginFootprint 3: HDR2.54-M-LI-2P; OriginFootprint 4: HDR2.54-WI-2P; OriginFootprint 5: HDR2.54-WS-2P; OriginFootprint 6: HDR2.54-Y-LI-2P; OriginFootprint 7: HDR2.54-M-WS-2P; OriginFootprint 8: KF2510-LI-2P; OriginFootprint 9: XH2.54-WS-2P; OriginFootprint 10: XH2.54-LS-2P; OriginFootprint 11: KF2EDGK-2.54-LI-2P; OriginFootprint 12: KF2EDGK-2.54-WI-2P; UniqueId: 0f3af21d7fc89682; AddInBom: yes; OriginModelName: HDR2.54-1P; BOM名称: 2P接插件; 联系售后: https://shop463601444.taobao.com; DesignItemID: Header 2; LibraryName: 5.4 - 接插件-脚距2.54 (100mil); SymbolName: Header 2; FootprintName: HDR2.54-LI-2P
footprint HDR2.54-Y-LI-2P (圆孔排母，2脚)
pins: 1, 2

## Header 2_2
designator P?, comment 电源
Header, 2-Pin; LatestRevisionDate: 17-Jul-2002; LatestRevisionNote: Re-released for DXP Platform.; Publisher: Altium Limited
signal-integrity model Connector
footprint CONN-TH_2P-P5.08
pins: 1, 2

## Header 12X2
designator J?, comment Header 2X12  (value not drawn)
12*2P接插件; 版权归属: 封装库来自淘宝卖家 ID：黄晶宝石; BOM名称: 12*2P接插件; 学习资源: https://shop463601444.taobao.com
footprint IDC2.54-LI-2x12P (24P简易牛角座)
pins: 1, 2, 3, 4, 5, 6, 7, 8, 9, 10, 11, 12, 13, 14, 15, 16, 17, 18, 19, 20, 21, 22, 23, 24

## hx pz2.54-1x2p zz
designator U?  (value not drawn)
插针结构:1x2P;间距:2.54mm;行距:-;圆针/方针:方针;安装方式:直插;排数:单排;总PIN位数:2P;额定电流:3A;额定电压:1kV;配合针长度:6mm;塑高:2.5mm;端接针长度:3mm;触头材质:黄铜;触头镀层:金;工作温度:-40℃~+105℃;颜色:黑色;; Manufacturer: hanxia(韩下); AddInBom: yes; ModelId: c7a9f3c3e6e34627af2bf939e464cb35; ModelName: HDR-TH_2P-P2.54-M-LI-1X2P; ModelTransform: 200,100,0,0,0,0,0,0,-118.11; Pin Structure: 1x2P; Pitch: 2.54mm; Circluar Pins/Square Pins: 方针; Current Rating: 3A; Voltage Rating (Max): 1kV; Symbol: HX PZ2.54-1X2P ZZ; LCSC Part Name: 1x2P 间距:2.54mm 方针 直插; SupplierPart: C32713268; ManufacturerPart: HX PZ2.54-1x2P ZZ; Supplier Footprint: 插件,P=2.54mm; JLCPCB Part Class: Extended Part; Datasheet: https://item.szlcsc.com/datasheet/HX%2520PZ2.54-1x2P%2520ZZ/34444548.html; Supplier: LCSC; ConvertToPcb: yes; FootprintName: HDR-TH_2P-P2.54-V-M-3; Row Spacing: -; Mounting Type: 直插; Number of Rows: 单排; Number of Pins: 2P; Length of Mating Pin: 6mm; Insulation Height: 2.5mm; Length of End Connection Pin: 3mm; Contact Material: 黄铜; Contact Plating: 金; Operating Temperature: -40℃~+105℃; Color: 黑色; Supplementary Features: -
footprint HDR-TH_2P-P2.54-V-M-3
pins: 1, 2

## Inductor
designator L?, comment 4.7uH
Inductor; Code_IEC: 1005; Value: 15uH   0.6A; Published: 8-Jun-2000; LatestRevisionDate: 29-May-2009; LatestRevisionNote: IPC-7351 Footprint Added.; PackageReference: 0402-A; Publisher: Altium Limited; PackageDescription: Chip Inductor; Code_JEITA: 0402
simulation model INDUCTOR (Inductor)
signal-integrity model Inductor
footprint 1210L
pins: 1, 2

## ksz8081rnaca-tr
designator U?
类型:PHY收发器;端口数量:1;MAC接口:RMII;; Manufacturer: MICROCHIP(美国微芯); AddInBom: yes; ModelId: 1e6a51e223ba431598528b34e5bdfcc9; ModelName: QFN-24_L4.0-W4.0-H0.9-P0.50; ModelTransform: 157.48,157.48,0,90,0,0,0,0,0; Number of ports: 1; MAC Interface: RMII; Ethernet Speed Standards: 10BASE-T；100BASE-TX; Data Rate: 10Mbit/s；100Mbit/s; Voltage - Supply: 3.3V; Symbol: KSZ8081RNACA-TR; LCSC Part Name: KSZ8081RNA/RND 10BASE-T/100BASE-TX PHY 收发器; SupplierPart: C100017; ManufacturerPart: KSZ8081RNACA-TR; Supplier Footprint: QFN-24-EP(4x4); JLCPCB Part Class: Extended Part; Datasheet: https://item.szlcsc.com/datasheet/KSZ8081RNACA-TR/101231.html; Supplier: LCSC; ConvertToPcb: yes; FootprintName: QFN-24_L4.0-W4.0-P0.50-BL-EP2.6; Type: PHY收发器; Operating Temperature: 0℃~+70℃; Features: 错误检测与恢复；低功耗模式；可编程LED指示；电缆诊断
footprint QFN-24_L4.0-W4.0-P0.50-BL-EP2.6
pins: 1 VDD_1.2, 2 VDDA_3.3, 3 RXM, 4 RXP, 5 TXM, 6 TXP, 7 XO, 8 XI, 9 REXT, 10 MDIO, 11 MDC, 12 RXD1, 13 RXD0, 14 VDDIO, 15 CRS_DV/PHYAD[1:0], 16 REF_CLK, 17 RXER, 18 INTRP, 19 TXEN, 20 TXD0, 21 TXD1, 22 GND, 23 LED0/ANEN_SPEED, 24 RST#, 25 EXP

## LED
designator LED?
footprint LED 0805R (红色0805LED                                       淘宝ID:黄晶宝石)
pins: 1 CATHODE, 2 ANODE

## lp5907mfx-3.3/nopb
designator U?  (value not drawn)
输出极性:正极;工作电压:5.5V;输出电压:3.3V;输出电流:250mA;电源纹波抑制比(PSRR):82dB@(1kHz);输出类型:固定;; Manufacturer: TI(德州仪器); AddInBom: yes; ModelId: 0a2a1b8f50944f73965918ad6e5fe167; ModelName: SOT-23-5_L2.9-W1.6-H1.1-LS2.8-P0.95; ModelTransform: 114.173,109.636,0,180,0,0,0,0,0; Output Configuration: 正极; Voltage - Supply: 5.5V; Output Voltage: 3.3V; Output Current: 250mA; Voltage Dropout: 250mV@(250mA); standby current: 12uA; Noise: 10uVrms; Output Type: 固定; Number of Outputs: 1; Symbol: LP5907MFX-3.3/NOPB; LCSC Part Name: 3.3V 250mA 5.5V; SupplierPart: C80670; ManufacturerPart: LP5907MFX-3.3/NOPB; Supplier Footprint: SOT-23-5; JLCPCB Part Class: Extended Part; Datasheet: https://www.ti.com/cn/lit/ds/symlink/lp5907.pdf; Supplier: LCSC; ConvertToPcb: yes; FootprintName: SOT-23-5_L3.0-W1.7-P0.95-LS2.8-BR; Power Supply Rejection Ratio (PSRR): 82dB@(1kHz); Features: 热关断；使能控制；输出放电；短路保护；输入欠压保护; Operating Temperature: -40℃~+125℃@(Tj)
footprint SOT-23-5_L3.0-W1.7-P0.95-LS2.8-BR
pins: 1 IN, 2 GND, 3 EN, 4 N/C, 5 OUT

## LT1793
designator U?
LT1793CS8#PBF; UniqueId: be87043ebfc5f98d; AddInBom: yes; OriginModelName: User Library-so-8; Device: LT1793; DesignItemID: LT1793; LibraryName: 1.6 - ADI系列精密运放; SymbolName: LT1793; FootprintName: SOP-8
footprint SOP-8
pins: 1 VOSADJ, 2 -IN, 3 +IN, 4 -VS, 5 VOSADJ, 6 OUT, 7 +VS, 8 NC

## m24c64-rmn6tp
designator U?  (value not drawn)
接口类型:I2C;存储容量:64Kbit;时钟频率(fc):1MHz;; Manufacturer: ST(意法半导体); AddInBom: yes; ModelId: 7abc64c95a1a4a04a4ef38f9097c870b; ModelName: SOIC-8_L5.0-W4.0-P1.27-LS6.0-BL; ModelTransform: 192.913,236.22,0,0,0,0,0,0,0; Interface: I2C; Memory Size: 64Kbit; Clock Frequency: 1MHz; Write Cycle Time(Tw): 5ms; Data Retention - TDR (Year): 200年; Write Cycle Endurance: 400万次; Voltage - Supply: 1.8V~5.5V; Symbol: M24C64-RMN6TP; LCSC Part Name: 64 Kbit串行I2C总线EEPROM; SupplierPart: C79988; ManufacturerPart: M24C64-RMN6TP; Supplier Footprint: SOIC-8; JLCPCB Part Class: Extended Part; Datasheet: https://item.szlcsc.com/datasheet/M24C64-RMN6TP/81133.html; Supplier: LCSC; ConvertToPcb: yes; FootprintName: SOIC-8_L5.0-W4.0-P1.27-LS6.0-BL; Features: 内置上电复位(POR)；硬件写保护功能；内置错误纠正码(ECC)功能; Operating Temperature: -40℃~+85℃
footprint SOIC-8_L5.0-W4.0-P1.27-LS6.0-BL
pins: 1 A0, 2 A1, 3 A2, 4 VSS, 5 SDA, 6 SCL, 7 #WC, 8 VCC

## mcp2515t-i/so
designator U?  (value not drawn)
MCP2515是一款独立的CAN控制器，支持CAN V2.0B协议，数据传输速率为1 Mbps。它通过SPI接口与MCU通信。; Manufacturer: MICROCHIP(美国微芯); AddInBom: yes; ModelId: 591e416e62784c3bb8a96e1097595c87; ModelName: SOIC-18_L11.6-W7.5-H2.7-LS10.3-P1.27; ModelTransform: 456.692,409.68154,0,0,0,0,0,0,0; Data Rate: 1Mbps; Current - Supply: 5mA; Voltage - Supply: 2.7V~5.5V; Quiescent Supply Current: 1uA; Protocol: SPI; Symbol: MCP2515T-I/SO; LCSC Part Name: 独立CAN控制器带SPI接口; SupplierPart: C153782; ManufacturerPart: MCP2515T-I/SO; Supplier Footprint: SOIC-18-300mil; JLCPCB Part Class: Extended Part; Datasheet: https://item.szlcsc.com/datasheet/MCP2515T-I%252FSO/165124.html; Supplier: LCSC; ConvertToPcb: yes; FootprintName: SOIC-18_L11.6-W7.5-P1.27-LS10.3-BL; Type: CAN控制器; Operating Temperature: -40℃~+85℃; Features: 可编程位时序；单次发送模式；低功耗模式
footprint SOIC-18_L11.6-W7.5-P1.27-LS10.3-BL
pins: 1 TXCAN, 2 RXCAN, 3 CLKOUT/SOF, 4 TX0RTS#, 5 TX1RTS#, 6 TX2RTS#, 7 OSC2, 8 OSC1, 9 VSS, 10 RX1BF#, 11 RX0BF#, 12 INT#, 13 SCK, 14 SI, 15 SO, 16 CS#, 17 RESET#, 18 VDD

## MicroXNJ
designator USB?  (value not drawn)
Manufacturer: SHOU HAN(首韩); Add into BOM: yes; Connector Type: Micro-B; Gender: 母; Number of Ports: 1; Number of Contacts: 5P; Current Rating - Power (Max): 1A; Symbol: MICROXNJ; Device: MicroXNJ; Supplier: LCSC; Supplier Part: C404969; Manufacturer Part: MicroXNJ; JLCPCB Part Class: Extended Part; LCSC Part Name: Micro-B 母 卧贴; Supplier Footprint: SMD; Datasheet: https://atta.szlcsc.com/upload/public/pdf/source/20220415/2494EDFF499AF6F852F7C820374B6AF3.pdf; Convert to PCB: yes; Standard: USB 2.0; Mounting Style: 卧贴; Operating Temperature Range: -20℃~+85℃
footprint MICRO-USB-SMD_MICROXNJ
pins: 1 VBUS, 2 D-, 3 D+, 4 ID, 5 GND, 6 SH1, 7 SH2, 8 SH3, 9 SH4

## mpz1608s221ata00
designator L?  (value not drawn)
标称阻抗@测试频率:220Ω@100MHz;误差:±25%;直流电阻(RDC):50mΩ;; Manufacturer: TDK; AddInBom: yes; ModelId: 2bc5ec593d464d6ba9807aec0b5673c2; ModelName: L0603_L1.6-W0.8-H0.5_BEAD; ModelTransform: 62.992,31.496,0,180,0,0,0.094,0.629,0; Tolerance: ±25%; DC Resistance: 50mΩ; Current Rating: 2.2A; Circuits: 1; Symbol: MPZ1608S221ATA00; LCSC Part Name: 单路 0603磁珠 阻抗220Ω@100MHz; SupplierPart: C76815; ManufacturerPart: MPZ1608S221ATA00; Supplier Footprint: 0603; JLCPCB Part Class: Extended Part; Datasheet: https://atta.szlcsc.com/upload/public/pdf/source/20160918/1474166931723.pdf; Supplier: LCSC; ConvertToPcb: yes; FootprintName: L0603; Impedance @ Frequency: 220Ω@100MHz
footprint L0603
pins: 1, 2

## opa192idbvr
designator U?  (value not drawn)
放大器数:单路;增益带宽积(GBP):10MHz;输入偏置电流(Ib):5pA;输入失调电压(Vos):5uV;压摆率(SR):20V/us;轨到轨:轨到轨输入,轨到轨输出;; Manufacturer: TI(德州仪器); AddInBom: yes; ModelId: 0a2a1b8f50944f73965918ad6e5fe167; ModelName: SOT-23-5_L2.9-W1.6-H1.1-LS2.8-P0.95; ModelTransform: 118.60433,114.173,0,90,0,0,0.0005,0.0005,0; Number of Channels: 单路; Gain Bandwidth Product: 10MHz; Ib - Input Bias Current: 5pA; Vos - Input Offset Voltage: 5uV; Common Mode Rejection Ratio(CMRR): 140dB; Slew Rate: 20V/us; Output Current: 65mA; Input Offset Voltage Drift(Vos TC): 200nV/℃; Quiescent Current(Iq): 1mA; Single Supply: 4.5V~36V; Dual Supply: -18V~-2.25V；2.25V~18V; Maximum Power Supply Range (Vdd-Vss): 36V; Noise density(eN): 5.5nV/√Hz@1kHz; Input Offset Current(Ios): 2pA; Symbol: OPA192IDBVR; LCSC Part Name: 36V低失调电压、低输入偏置电流、轨到轨输入/输出精密运算放大器，具有e-trim特性; SupplierPart: C139648; ManufacturerPart: OPA192IDBVR; Supplier Footprint: SOT-23-5; JLCPCB Part Class: Extended Part; Datasheet: https://www.ti.com/cn/lit/gpn/opa192; Supplier: LCSC; ConvertToPcb: yes; FootprintName: SOT-23-5_L3.0-W1.7-P0.95-LS2.8-BL; Rail to Rail: 轨到轨输入,轨到轨输出; Operating Temperature: -40℃~+125℃
footprint SOT-23-5_L3.0-W1.7-P0.95-LS2.8-BL
pins: 1 OUT, 2 V-, 3 IN+, 4 IN-, 5 V+

## ot2el4c4ji-111olp-24.576m
designator OSC?  (value not drawn)
频率:24.576MHz;常温频差:±10ppm;输出模式:CMOS;工作电压:1.8V~3.3V;频率稳定度:±20ppm;; Manufacturer: YXC(扬兴晶振); AddInBom: yes; ModelId: ae22b8d143894765bc8100c37cb6356f; ModelName: OSC-SMD_4P-L3.2-W2.5-H1.0; ModelTransform: 125.984,98.425,0,0,0,0,0,0,0; Normal temperature Frequency Tolerance: ±10ppm; Output Type: CMOS; Frequency Stability: ±20ppm; Symbol: OT2EL4C4JI-111OLP-24.576M; LCSC Part Name: YSO110TR 24.576MHZ 1.8V-3.3V ±10PPM -40~85℃（±20PPM) CMOS; SupplierPart: C5203547; ManufacturerPart: OT2EL4C4JI-111OLP-24.576M; Supplier Footprint: SMD3225-4P; JLCPCB Part Class: Extended Part; Datasheet: https://item.szlcsc.com/datasheet/OT2EL4C4JI-111OLP-24.576M/5892909.html; Supplier: LCSC; ConvertToPcb: yes; FootprintName: OSC-SMD_4P-L3.2-W2.5-BL; Value: 24.576MHz; Voltage - Supply: 1.8V~3.3V; Operating Temperature: -40℃~+85℃
footprint OSC-SMD_4P-L3.2-W2.5-BL
pins: 1 Tri-state, 2 GND, 3 OUT, 4 VDD

## pc817x2csp9f
designator U?  (value not drawn)
输入类型:DC;正向压降(Vf):1.2V;输出电流:50mA;隔离电压(Vrms):5kV;直流反向耐压(Vr):6V;负载电压:80V;输出通道数:-;集射极饱和电压(VCE(sat)):200mV@20mA,1mA;; Manufacturer: SHARP(夏普); AddInBom: yes; ModelId: 991879f0d3e24dbd9895164815fb95aa; ModelName: SMD-4_L4.6-W6.5-H3.7-LS10.2-P2.54; ModelTransform: 401.94494,181.102,0,0,0,0,0,0.003,0; Input type: DC; Output Type: 光电三极管; Voltage - Forward(Vf): 1.2V; Output Current: 50mA; Isolation Voltage(Vrms): 5kV; Reverse Voltage: 6V; Load Voltage: 80V; Rise time: 4us; Fall time: 3us; Current Transfer Ratio (CTR) Minimum: 50%; Current Transfer Ratio (CTR) Maximum/Saturation Value: 600%; Total Power Dissipation(Pd): 200mW; Symbol: PC817X2CSP9F; LCSC Part Name: DC输入 隔离电压(rms):5000V; SupplierPart: C66405; ManufacturerPart: PC817X2CSP9F; Supplier Footprint: SMD-4P; JLCPCB Part Class: Extended Part; Datasheet: https://item.szlcsc.com/datasheet/PC817X2CSP9F/67489.html; Supplier: LCSC; ConvertToPcb: yes; FootprintName: SMD-4_L4.6-W6.5-P2.54-LS10.2-TL; Number of Outputs: -; Vce Saturation(VCE(sat)): 200mV@20mA,1mA; Operating Temperature: -30℃~+100℃; Forward Current(If): 50mA
footprint SMD-4_L4.6-W6.5-P2.54-LS10.2-TL
pins: 1, 2, 3, 4

## pesd2can,215
designator D?  (value not drawn)
极性:双向;反向截止电压(Vrwm):24V;钳位电压:41V;峰值脉冲电流(Ipp):5A@8/20us;峰值脉冲功率(Ppp):230W@8/20us;击穿电压:28V;; Manufacturer: Nexperia(安世); AddInBom: yes; ModelId: c62791f0466c4ae2a892c056b845b0ca; ModelName: SOT-23-3P_L2.9-W1.3-H1.0-LS2.4-P0.95; ModelTransform: 98.425,114.173,0,180,0,0,0.0005,-0.0005,0; Polarity: 双向; Reverse Stand-Off Voltage (Vrwm): 24V; Clamping Voltage: 41V; Voltage - Breakdown: 28V; Reverse Leakage Current (Ir): 1nA; Number of Channels: 双路; level of protection: IEC 61000-4-5；IEC 61000-4-2; Type: ESD; Junction Capacitance: 25pF; Symbol: PESD2CAN,215; LCSC Part Name: 双向ESD 24V截止 峰值脉冲电流：5A@8/20us; SupplierPart: C75176; ManufacturerPart: PESD2CAN,215; Supplier Footprint: SOT-23; JLCPCB Part Class: Extended Part; Datasheet: https://item.szlcsc.com/datasheet/PESD2CAN%252C215/76300.html; Supplier: LCSC; ConvertToPcb: yes; FootprintName: SOT-23-3_L2.9-W1.3-P1.90-LS2.4-BR; Peak Pulse Current (Ipp): 5A@8/20us; Peak Pulse Power Dissipation (Ppp): 230W@8/20us; Operating Temperature: -55℃~+150℃@(Ta)
footprint SOT-23-3_L2.9-W1.3-P1.90-LS2.4-BR
pins: 1, 2, 3

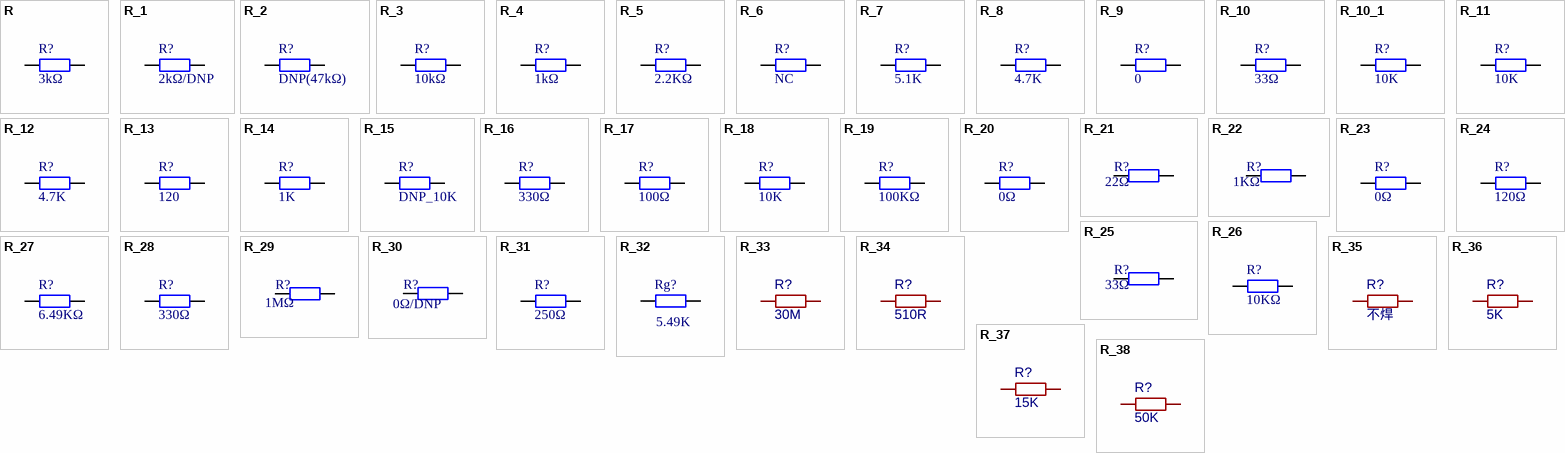
[diagram p2: symbols R to R_38]

## R
designator R?, comment 3kΩ
贴片电阻; 版权归属: 源创客; BOM名称: 贴片电阻; 学习资源: www.ooocke.com
footprint 0603R
pins: 1, 2

## R_1
designator R?, comment 2kΩ/DNP
贴片电阻; 版权归属: 源创客; BOM名称: 贴片电阻; 学习资源: www.ooocke.com
footprint 0603R
pins: 1, 2

## R_2
designator R?, comment DNP(47kΩ)
贴片电阻; 版权归属: 源创客; BOM名称: 贴片电阻; 学习资源: www.ooocke.com
footprint 0603R
pins: 1, 2

## R_3
designator R?, comment 10kΩ
贴片电阻; 版权归属: 源创客; BOM名称: 贴片电阻; 学习资源: www.ooocke.com
footprint 0603R
pins: 1, 2

## R_4
designator R?, comment 1kΩ
贴片电阻; 版权归属: 源创客; BOM名称: 贴片电阻; 学习资源: www.ooocke.com
footprint 0603R
pins: 1, 2

## R_5
designator R?, comment 2.2KΩ
贴片电阻; 版权归属: 源创客; BOM名称: 贴片电阻; 学习资源: www.ooocke.com
footprint 0603R
pins: 1, 2

## R_6
designator R?, comment NC
贴片电阻; 版权归属: 源创客; BOM名称: 贴片电阻; 学习资源: www.ooocke.com
footprint 0603R
pins: 1, 2

## R_7
designator R?, comment 5.1K
贴片电阻; 版权归属: 源创客; BOM名称: 贴片电阻; 学习资源: www.ooocke.com
footprint 0603R
pins: 1, 2

## R_8
designator R?, comment 4.7K
贴片电阻; 版权归属: 源创客; BOM名称: 贴片电阻; 学习资源: www.ooocke.com
footprint 0603R
pins: 1, 2

## R_9
designator R?, comment 0
贴片电阻; 版权归属: 源创客; BOM名称: 贴片电阻; 学习资源: www.ooocke.com
footprint 0603R
pins: 1, 2

## R_10
designator R?, comment 33Ω
贴片电阻; 版权归属: 源创客; BOM名称: 贴片电阻; 学习资源: www.ooocke.com
footprint 0603R
pins: 1, 2

## R_10_1
designator R?, comment 10K
贴片电阻; 版权归属: 源创客; BOM名称: 贴片电阻; 学习资源: www.ooocke.com
footprint 0603R
pins: 1, 2

## R_11
designator R?, comment 10K
贴片电阻; 版权归属: 来自淘宝 ID：黄晶宝石; 封装库来自淘宝卖家 ID：黄晶宝石: 其他店铺购入均为盗版，不享受售后技术支持服务，请立即申请退款; BOM名称: 贴片电阻; 联系售后: https://shop463601444.taobao.com
footprint 0603R
pins: 1, 2

## R_12
designator R?, comment 4.7K
贴片电阻; 版权归属: 来自淘宝 ID：黄晶宝石; 封装库来自淘宝卖家 ID：黄晶宝石: 其他店铺购入均为盗版，不享受售后技术支持服务，请立即申请退款; BOM名称: 贴片电阻; 联系售后: https://shop463601444.taobao.com
footprint 0603R
pins: 1, 2

## R_13
designator R?, comment 120
贴片电阻; 版权归属: 来自淘宝 ID：黄晶宝石; 封装库来自淘宝卖家 ID：黄晶宝石: 其他店铺购入均为盗版，不享受售后技术支持服务，请立即申请退款; BOM名称: 贴片电阻; 联系售后: https://shop463601444.taobao.com
footprint 0603R
pins: 1, 2

## R_14
designator R?, comment 1K
贴片电阻; 版权归属: 来自淘宝 ID：黄晶宝石; 封装库来自淘宝卖家 ID：黄晶宝石: 其他店铺购入均为盗版，不享受售后技术支持服务，请立即申请退款; BOM名称: 贴片电阻; 联系售后: https://shop463601444.taobao.com
footprint 0603R
pins: 1, 2

## R_15
designator R?, comment DNP_10K
贴片电阻; 版权归属: 来自淘宝 ID：黄晶宝石; 封装库来自淘宝卖家 ID：黄晶宝石: 其他店铺购入均为盗版，不享受售后技术支持服务，请立即申请退款; BOM名称: 贴片电阻; 联系售后: https://shop463601444.taobao.com
footprint 0603R
pins: 1, 2

## R_16
designator R?, comment 330Ω
贴片电阻; 版权归属: 源创客; BOM名称: 贴片电阻; 学习资源: www.ooocke.com
footprint 0603R
pins: 1, 2

## R_17
designator R?, comment 100Ω
贴片电阻; 版权归属: 源创客; BOM名称: 贴片电阻; 学习资源: www.ooocke.com
footprint 0603R
pins: 1, 2

## R_18
designator R?, comment 10K
贴片电阻; 版权归属: 源创客; BOM名称: 贴片电阻; 学习资源: www.ooocke.com
footprint 0603R
pins: 1, 2

## R_19
designator R?, comment 100KΩ
贴片电阻; 版权归属: 源创客; BOM名称: 贴片电阻; 学习资源: www.ooocke.com
footprint 0603R
pins: 1, 2

## R_20
designator R?, comment 0Ω
贴片电阻; 版权归属: 源创客; BOM名称: 贴片电阻; 学习资源: www.ooocke.com
footprint 0603R
pins: 1, 2

## R_21
designator R?, comment 22Ω
贴片电阻; 版权归属: 来自淘宝 ID：黄晶宝石; 封装库来自淘宝卖家 ID：黄晶宝石: 其他店铺购入均为盗版，不享受售后技术支持服务，请立即申请退款; BOM名称: 贴片电阻; 联系售后: https://shop463601444.taobao.com
footprint 0603R
pins: 1, 2

## R_22
designator R?, comment 1KΩ
贴片电阻; 版权归属: 来自淘宝 ID：黄晶宝石; 封装库来自淘宝卖家 ID：黄晶宝石: 其他店铺购入均为盗版，不享受售后技术支持服务，请立即申请退款; BOM名称: 贴片电阻; 联系售后: https://shop463601444.taobao.com
footprint 0603R
pins: 1, 2

## R_23
designator R?, comment 0Ω
贴片电阻; 版权归属: 来自淘宝 ID：黄晶宝石; 封装库来自淘宝卖家 ID：黄晶宝石: 其他店铺购入均为盗版，不享受售后技术支持服务，请立即申请退款; BOM名称: 贴片电阻; 联系售后: https://shop463601444.taobao.com
footprint 0603R
pins: 1, 2

## R_24
designator R?, comment 120Ω
贴片电阻; 版权归属: 来自淘宝 ID：黄晶宝石; 封装库来自淘宝卖家 ID：黄晶宝石: 其他店铺购入均为盗版，不享受售后技术支持服务，请立即申请退款; BOM名称: 贴片电阻; 联系售后: https://shop463601444.taobao.com
footprint 0603R
pins: 1, 2

## R_25
designator R?, comment 33Ω
贴片电阻; 版权归属: 来自淘宝 ID：黄晶宝石; 封装库来自淘宝卖家 ID：黄晶宝石: 其他店铺购入均为盗版，不享受售后技术支持服务，请立即申请退款; BOM名称: 贴片电阻; 联系售后: https://shop463601444.taobao.com
footprint 0603R
pins: 1, 2

## R_26
designator R?, comment 10KΩ
贴片电阻; 版权归属: 来自淘宝 ID：黄晶宝石; 封装库来自淘宝卖家 ID：黄晶宝石: 其他店铺购入均为盗版，不享受售后技术支持服务，请立即申请退款; BOM名称: 贴片电阻; 联系售后: https://shop463601444.taobao.com
footprint 0603R
pins: 1, 2

## R_27
designator R?, comment 6.49KΩ
贴片电阻1%; BOM名称: 贴片电阻; 版权归属: 来自淘宝 ID：黄晶宝石; 封装库来自淘宝卖家 ID：黄晶宝石: 其他店铺购入均为盗版，不享受售后技术支持服务，请立即申请退款; 联系售后: https://shop463601444.taobao.com
footprint 0603R
pins: 1, 2

## R_28
designator R?, comment 330Ω
贴片电阻; 版权归属: 来自淘宝 ID：黄晶宝石; 封装库来自淘宝卖家 ID：黄晶宝石: 其他店铺购入均为盗版，不享受售后技术支持服务，请立即申请退款; BOM名称: 贴片电阻; 联系售后: https://shop463601444.taobao.com
footprint 0603R
pins: 1, 2

## R_29
designator R?, comment 1MΩ
贴片电阻; 版权归属: 来自淘宝 ID：黄晶宝石; 封装库来自淘宝卖家 ID：黄晶宝石: 其他店铺购入均为盗版，不享受售后技术支持服务，请立即申请退款; BOM名称: 贴片电阻; 联系售后: https://shop463601444.taobao.com
footprint 0603R
pins: 1, 2

## R_30
designator R?, comment 0Ω/DNP
贴片电阻; 版权归属: 来自淘宝 ID：黄晶宝石; 封装库来自淘宝卖家 ID：黄晶宝石: 其他店铺购入均为盗版，不享受售后技术支持服务，请立即申请退款; BOM名称: 贴片电阻; 联系售后: https://shop463601444.taobao.com
footprint 0603R
pins: 1, 2

## R_31
designator R?, comment 250Ω
贴片电阻; 版权归属: 来自淘宝 ID：黄晶宝石; 封装库来自淘宝卖家 ID：黄晶宝石: 其他店铺购入均为盗版，不享受售后技术支持服务，请立即申请退款; BOM名称: 贴片电阻; 联系售后: https://shop463601444.taobao.com
footprint 0603R
pins: 1, 2

## R_32
designator Rg?, comment 5.49K
贴片电阻; 版权归属: 来自淘宝 ID：黄晶宝石; 封装库来自淘宝卖家 ID：黄晶宝石: 其他店铺购入均为盗版，不享受售后技术支持服务，请立即申请退款; BOM名称: 贴片电阻; 联系售后: https://shop463601444.taobao.com
footprint 0603R
pins: 1, 2

## R_33
designator R?, comment 30M
贴片电阻; Device: R; 版权归属: 来自淘宝 ID：黄晶宝石; 封装库来自淘宝卖家 ID：黄晶宝石: 其他店铺购入均为盗版，不享受售后技术支持服务，请立即申请退款; Origin Footprint: R 0201_L; OriginFootprint 2: R 0402_L; OriginFootprint 3: R 0805_L; OriginFootprint 4: R 1206_L; OriginFootprint 5: R 1210_L; OriginFootprint 6: R 1812_L; OriginFootprint 7: R 2010_L; OriginFootprint 8: R 2512_L; OriginFootprint 9: R 0201_M; OriginFootprint 10: R 0402_M; OriginFootprint 11: R 0603_M; OriginFootprint 12: R 0805_M; OriginFootprint 13: R 1206_M; OriginFootprint 14: R 1210_M; OriginFootprint 15: R 1812_M; OriginFootprint 16: R 2010_M; OriginFootprint 17: R 2512_M; UniqueId: 79cad709e969d650; AddInBom: yes; OriginModelName: R 0603; BOM名称: 贴片电阻; 联系售后: https://shop463601444.taobao.com; DesignItemID: R; LibraryName: 0.1 - 电阻-电容-电感; SymbolName: R; FootprintName: R 0603_L
footprint 0603R
pins: 1, 2